# EAGLE library part SW_DIP-3P (library dp_devices.v6)
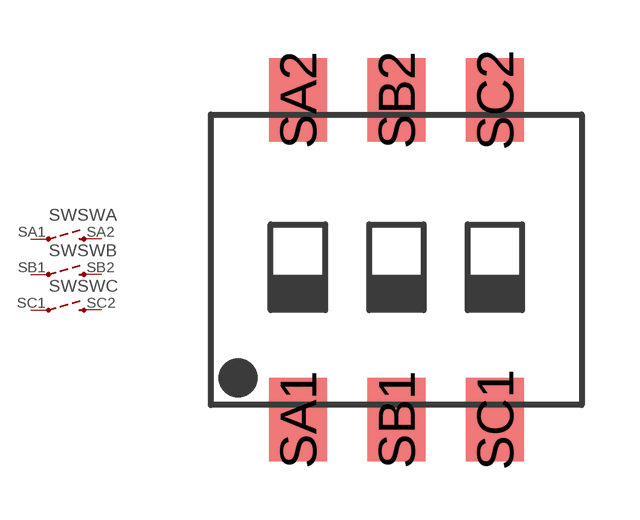
[diagram p172: symbol with the pads of SW-SMT-3; footprint SW-SMT-3]

Designator prefix SW; gates SWA=SWITCH_4 SWB=SWITCH_4 SWC=SWITCH_4

## SW_DIP-3PSMT  [SW-SMT-3]
SA1  SWA:1  pas
SA2  SWA:2  pas
SB1  SWB:1  pas
SB2  SWB:2  pas
SC1  SWC:1  pas
SC2  SWC:2  pas

## Footprint SW-SMT-3 (pad centres in mm)
SDA03H0SB
smd 1.5 x 2.15: SA1 -2.54,-4.125; SA2 -2.54,4.125; SB1 0,-4.125; SB2 0,4.125; SC1 2.54,-4.125; SC2 2.54,4.125